# Altium footprint library Capacitors.PcbLib: 59 footprints (part 4 of 4)
Each footprint in its own frame and in the unit in brackets; x right, y up, seen from the top. Pads: shape width x height; smd on the part's side, far side on the other; paste and mask are expansions set on the pad; w line width, h text height; cw(c..) or ccw(c..) is an arc to the next point about the centre after c.
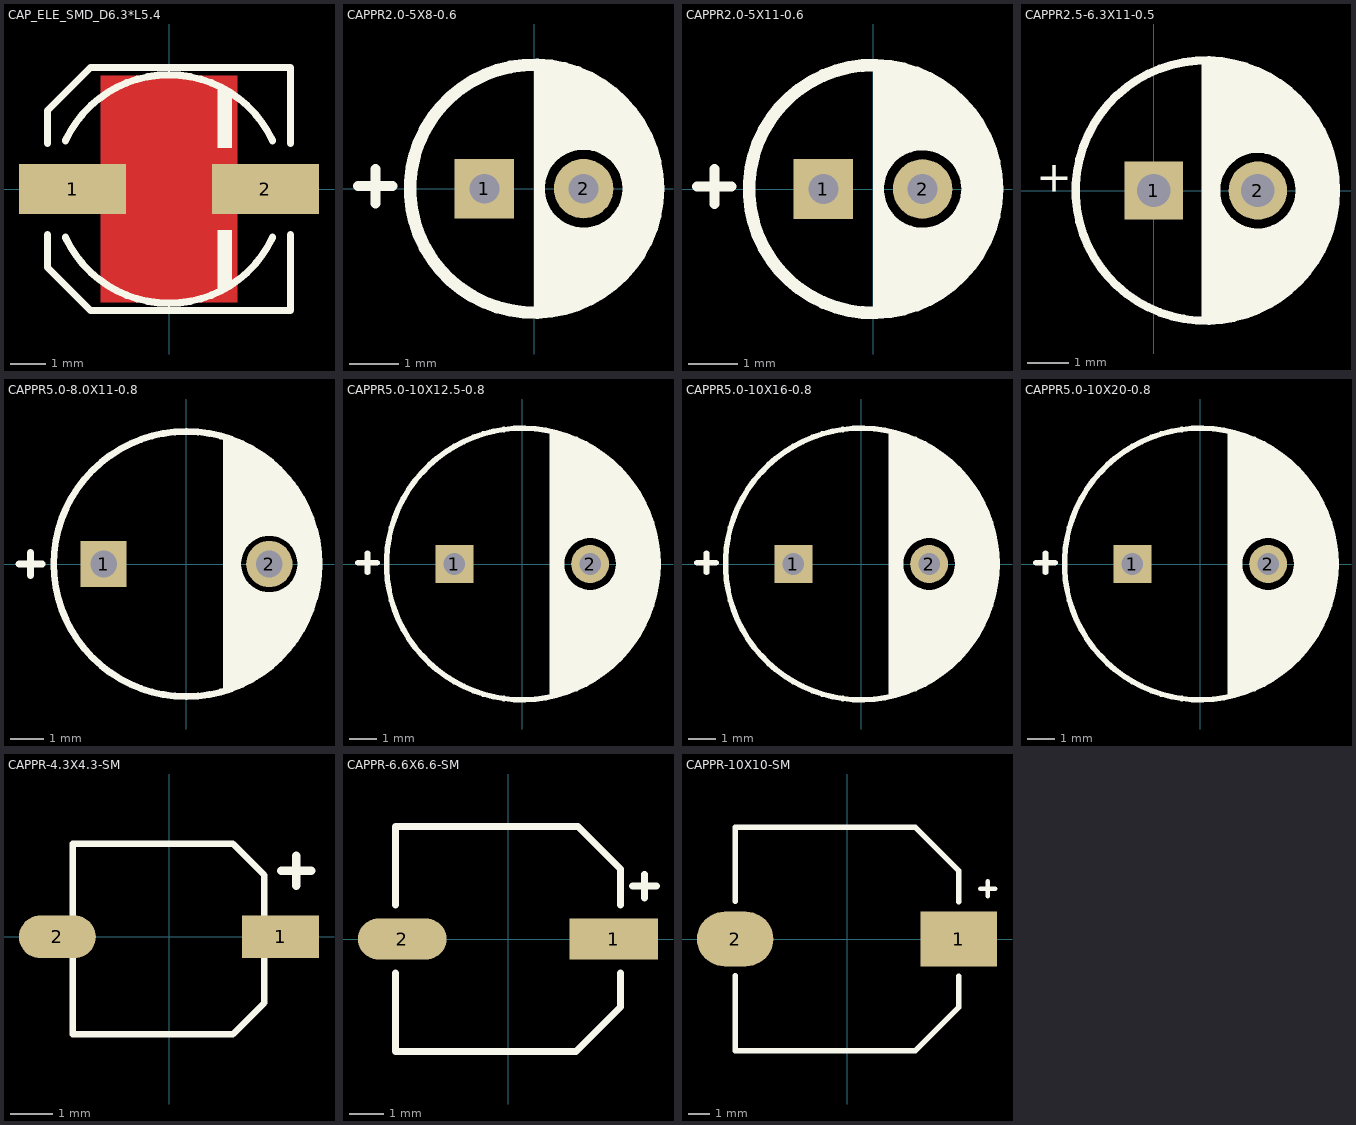
[diagram p3: the footprints below, top view; thin cyan lines are the x and y axes]

## CAP_ELE_SMD_D6.3*L5.4 [mm] "Electrolytic Cap, D: 6.3mm L: 5.4mm, Size D"
height 4
pads (2):
  rect 3x1.4 smd paste-0.154: 1(-2.7,0) 2(2.7,0)
Top Layer:
  pour cut-out: 1.905,3.175 1.905,-3.175 -1.905,-3.175 -1.905,3.175
Top Overlay:
  rectangle: 1.36,1.143 1.76,2.8
  rectangle: 1.36,-2.8 1.76,-1.143
  lines w0.2: -3.4,-1.27 -3.4,-2.2 -2.2,-3.4 3.4,-3.4 3.4,-1.27 ; -3.4,1.27 -3.4,2.2 -2.2,3.4 3.4,3.4 3.4,1.27 ; -2.9,-1.352 ccw(c0,0) 2.9,-1.352 ; -2.9,1.352 cw(c0,0) 2.9,1.352
3D body "User Library-ALU-D.STEP": height 5.4, standoff 0, extent -3.5,-3.3 3.5,3.3

## CAPPR2.0-5X8-0.6 [mm]
pads (2):
  rect 1.2x1.2 hole 0.6: 1(-1,0)
  round 1.2 hole 0.6: 2(1,0)
Top Overlay:
  circle w0.254: c0,0 r2.5
  circle w0.203: c1,0 r0.885
  region: 0,0 0.127,0 0.131,-0.087 0.165,-0.258 0.232,-0.419 0.329,-0.564 0.452,-0.687 0.597,-0.784 0.758,-0.851 0.929,-0.885 1.016,-0.889 1.101,-0.885 1.268,-0.852 1.426,-0.786 1.568,-0.692 1.688,-0.571 1.783,-0.429 1.848,-0.272 1.881,-0.105 1.885,-0.02 1.885,0 2.5,0 2.5,-0.015 2.5,-0.261 2.404,-0.744 2.215,-1.199 1.942,-1.608 1.594,-1.956 1.184,-2.23 0.729,-2.419 0.246,-2.515 0,-2.515
  region: 0,0 0.127,0 0.127,0.025 0.131,0.108 0.163,0.269 0.226,0.421 0.317,0.557 0.433,0.673 0.57,0.765 0.722,0.828 0.883,0.86 0.965,0.864 1.022,0.864 1.106,0.859 1.273,0.826 1.429,0.762 1.57,0.668 1.689,0.548 1.783,0.407 1.848,0.251 1.881,0.085 1.885,0 1.885,-0.015 2.5,-0.015 2.5,-0.011 2.5,0.235 2.404,0.718 2.215,1.173 1.942,1.583 1.594,1.931 1.184,2.205 0.729,2.393 0.246,2.489 0,2.489
  lines w0.203: -3.55,0.05 -3.2,0.05 ; -3.2,-0.3 -3.2,0.05 ; -3.2,0.4 -3.2,0.05 ; -2.85,0.05 -3.2,0.05
3D body "3.0.STEP": height 8, standoff -1.28, extent -2.5,-2.5 2.5,2.499

## CAPPR2.0-5X11-0.6 [mm]
pads (2):
  rect 1.2x1.2 hole 0.6: 1(-1,0)
  round 1.2 hole 0.6: 2(1,0)
Top Overlay:
  circle w0.254: c0,0 r2.5
  circle w0.203: c1,0 r0.881
  region: 0,-2.515 0,0 0.127,0 0.131,-0.087 0.165,-0.258 0.232,-0.419 0.329,-0.564 0.452,-0.687 0.597,-0.784 0.758,-0.851 0.929,-0.885 1.016,-0.889 1.101,-0.885 1.267,-0.852 1.424,-0.787 1.565,-0.693 1.685,-0.573 1.779,-0.432 1.844,-0.275 1.877,-0.109 1.881,-0.024 1.881,0 2.5,0 2.5,-0.015 2.5,-0.261 2.404,-0.744 2.215,-1.199 1.942,-1.608 1.594,-1.956 1.184,-2.23 0.729,-2.419 0.246,-2.515
  region: 0,0 0.127,0 0.127,0.051 0.131,0.133 0.163,0.294 0.226,0.446 0.317,0.583 0.433,0.699 0.57,0.79 0.722,0.853 0.883,0.885 0.965,0.889 0.992,0.889 1.079,0.885 1.25,0.851 1.411,0.784 1.556,0.687 1.679,0.564 1.776,0.419 1.843,0.258 1.877,0.087 1.881,0 1.881,-0.007 2.5,-0.007 2.5,0.015 2.5,0.261 2.404,0.744 2.215,1.199 1.942,1.608 1.594,1.956 1.184,2.23 0.729,2.419 0.246,2.515 0,2.515
  lines w0.203: -3.55,0.05 -3.2,0.05 ; -3.2,-0.3 -3.2,0.05 ; -3.2,0.4 -3.2,0.05 ; -2.85,0.05 -3.2,0.05
3D body "User Library-Cap electro 5x11x2mm.step": height 11.33, standoff -3.47, extent -2.525,-2.54 2.525,2.511

## CAPPR2.5-6.3X11-0.5 [mil]
pads (2):
  rect 56x56 hole 32: 1(0,0)
  round 56 hole 32: 2(100,0)
Top Overlay:
  circle w10: c100,0 r41.23
  circle w8: c50,0 r125
  region: 52,128 54,126 54,54 51,51 51,2 55,-2 60,3 60,21 78,39 118,39 142,15 142,-14 115,-41 87,-41 63,-17 63,-11 56,-4 55,-5 51,-5 51,-119 50,-120 55,-125 77,-125 88,-114 88,-118 97,-118 107,-108 114,-108 156,-66 156,-59 165,-50 165,-39 173,-31 173,13 174,14 171,17 171,38 162,47 162,58 147,73 147,75 112,110 100,110 96,114
  lines w8: 50,-120 50,120
  text "+" at -113,-1 h30
3D body "User Library-Cap-EL(6_3x11-2_5).step": height 433.15, standoff -125.98, extent -76.01,-120.98 172.1,126.99

## CAPPR5.0-8.0X11-0.8 [mm]
pads (2):
  rect 1.4x1.4 hole 0.8: 1(-2.5,0)
  round 1.4 hole 0.8: 2(2.5,0)
Top Overlay:
  circle w0.203: c0,0 r4
  circle w0.5: c2.5,0 r1.1
  lines w0.203: -5.05,0 -4.7,0 ; -4.7,-0.35 -4.7,0 ; -4.7,0.35 -4.7,0 ; -4.35,0 -4.7,0 ; 1.2,-3.8 1.2,3.8 ; 1.3,-3.6 1.7,-3.6 ; 1.4,-3.6 1.4,3.7 ; 1.4,-3.4 2.1,-3.4 2.5,-3 2.5,-1.3 ; 1.6,-3.4 1.6,-0.8 ; 1.6,0.8 1.6,3.6 ; 1.7,-3.4 1.7,-0.9 ; 1.8,-3.4 1.8,-1 ; 1.8,1 1.8,3.5 ; 2,-3.3 2,-1.1 ; 2,1.1 2,3.4 ; 2.1,-3.2 2.1,-1.2 ; 2.2,1.2 2.2,3.3 ; 2.3,-3.2 2.3,-1.2 ; 2.4,3.1 2.4,1.2 2.6,1.4 2.6,3 ; 2.597,1.397 2.8,1.397 2.6,1.597 2.6,1.651 ; 2.7,-2.9 2.7,-1.2 ; 2.8,-2.8 2.8,-1.2 ; 2.8,1.2 2.8,2.7 ; 3,-2.6 3,-1.1 ; 3,1 3,2.6 ; 3.2,-2.4 3.2,-1 ; 3.2,0.9 3.2,2.4 ; 3.4,-1.9 3.4,-0.8 ; 3.4,0.7 3.4,2 ; 3.6,-1.7 3.6,1.7 ; 3.7,-1.38 3.7,-0.87 3.835,-0.735 3.6,-0.735 3.9,-0.435 3.9,0.8 ; 3.7,-1.1 3.7,1.2 3.7,1 3.9,0.8 ; 3.9,-0.8 3.9,0.8
  lines w0.254: 2.6,2.8 2.7,2.8 2.3,3.2 2.3,3.1 3.3,2.1 ; 3.4,-2 3.4,-1.6
3D body "RC.3-.0.STEP": height 12.5, standoff -2, extent -4,-4 4,4

## CAPPR5.0-10X12.5-0.8 [mm]
pads (2):
  rect 1.4x1.4 hole 0.8: 1(-2.5,0)
  round 1.4 hole 0.8: 2(2.5,0)
Top Overlay:
  circle w0.5: c2.5,0 r1.2
  circle w0.203: c0,0 r5
  rectangle: 1,-4.8 1.4,4.8
  rectangle: 1.3,-4.7 1.5,4.8
  rectangle: 1.45,1 2.8,4.2
  rectangle: 2.7,1 3.5,3.6
  rectangle: 3.5,-3.2 3.8,3.3
  rectangle: 1.5,-3.5 3.5,-1
  rectangle: 1.5,-4.2 2.8,-3.3
  rectangle: 3.7,-2.6 4.2,2.8
  rectangle: 4.1,-1.8 4.6,2.2
  rectangle: 4.5,-1.1 4.9,1.4
  lines w0.203: -6.05,0.05 -5.7,0.05 ; -5.7,-0.3 -5.7,0.05 ; -5.7,0.4 -5.7,0.05 ; -5.35,0.05 -5.7,0.05
  lines w1: 1.514,-4.238 ccw(c0,0) 1.569,4.217
3D body "User Library-CAP_Electrolytic_10X14_.step": height 14.1, standoff -4.72, extent -5,-5.055 5,4.945

## CAPPR5.0-10X16-0.8 [mm]
pads (2):
  rect 1.4x1.4 hole 0.8: 1(-2.5,0)
  round 1.4 hole 0.8: 2(2.5,0)
Top Overlay:
  circle w0.5: c2.5,0 r1.2
  circle w0.203: c0,0 r5
  rectangle: 1,-4.8 1.4,4.8
  rectangle: 1.3,-4.7 1.5,4.8
  rectangle: 1.45,1 2.8,4.2
  rectangle: 2.7,1 3.5,3.6
  rectangle: 3.5,-3.2 3.8,3.3
  rectangle: 1.5,-3.5 3.5,-1
  rectangle: 1.5,-4.2 2.8,-3.3
  rectangle: 3.7,-2.6 4.2,2.8
  rectangle: 4.1,-1.8 4.6,2.2
  rectangle: 4.5,-1.1 4.9,1.4
  lines w0.203: -6.05,0.05 -5.7,0.05 ; -5.7,-0.3 -5.7,0.05 ; -5.7,0.4 -5.7,0.05 ; -5.35,0.05 -5.7,0.05
  lines w1: 1.514,-4.238 ccw(c0,0) 1.569,4.217
3D body "RC.3-.1.STEP": height 15.68, standoff -2.45, extent -5.1,-5.1 4.9,4.9

## CAPPR5.0-10X20-0.8 [mm]
pads (2):
  rect 1.4x1.4 hole 0.8: 1(-2.5,0)
  round 1.4 hole 0.8: 2(2.5,0)
Top Overlay:
  circle w0.203: c0,0 r5
  circle w0.5: c2.5,0 r1.2
  rectangle: 4.5,-1.1 4.9,1.4
  rectangle: 4.1,-1.8 4.6,2.2
  rectangle: 3.7,-2.6 4.2,2.8
  rectangle: 1.5,-4.2 2.8,-3.3
  rectangle: 1.5,-3.5 3.5,-1
  rectangle: 3.5,-3.2 3.8,3.3
  rectangle: 2.7,1 3.5,3.6
  rectangle: 1.45,1 2.8,4.2
  rectangle: 1.3,-4.7 1.5,4.8
  rectangle: 1,-4.8 1.4,4.8
  lines w0.203: -6.05,0.05 -5.7,0.05 ; -5.7,-0.3 -5.7,0.05 ; -5.7,0.4 -5.7,0.05 ; -5.35,0.05 -5.7,0.05
  lines w1: 1.514,-4.238 ccw(c0,0) 1.569,4.217
3D body "User Library-CAP_Electrolytic_10X20.step": height 20.1, standoff -4.72, extent -4.996,-5 5.004,5

## CAPPR-4.3X4.3-SM [mm]
pads (2):
  rect 1.8x1 smd: 1(2.616,0)
  oval 1.8x1 smd: 2(-2.616,0)
Top Overlay:
  lines w0.152: -2.261,-2.286 1.499,-2.286 2.235,-1.549 2.235,1.448 1.499,2.184 -2.261,2.184 -2.261,-2.286
  lines w0.203: 2.634,1.55 2.984,1.55 ; 2.984,1.2 2.984,1.55 ; 2.984,1.9 2.984,1.55 ; 3.334,1.55 2.984,1.55
3D body "User Library-cap-elec-430x430h390.step": height 3.9, standoff 0, extent -2.675,-2.201 2.625,2.099

## CAPPR-6.6X6.6-SM [mm]
pads (2):
  rect 2.6x1.2 smd: 1(3.1,0)
  oval 2.6x1.2 smd: 2(-3.1,0)
Top Overlay:
  lines w0.203: -3.3,-1 -3.3,-3.3 2,-3.3 3.3,-2 3.3,-1 ; -3.3,1 -3.3,3.3 2.05,3.3 3.3,2.05 3.3,1 ; 3.65,1.55 4,1.55 ; 4,1.2 4,1.55 ; 4,1.9 4,1.55 ; 4.35,1.55 4,1.55
3D body "CAP 4040.STEP": height 8, standoff 0, extent -3.656,-3.05 3.456,3.1

## CAPPR-10X10-SM [mm]
pads (2):
  rect 3.5x2.5 smd: 1(5.125,0)
  oval 3.5x2.5 smd: 2(-5.125,0)
Top Overlay:
  lines w0.203: 6.1,2.3 6.45,2.3 ; 6.45,1.95 6.45,2.3 ; 6.45,2.65 6.45,2.3 ; 6.8,2.3 6.45,2.3
  lines w0.254: -5.125,-1.675 -5.125,-5.125 3.125,-5.125 5.125,-3.125 5.125,-1.7 ; -5.125,1.725 -5.125,5.125 3.125,5.125 5.125,3.125 5.125,1.7
3D body "CAP 4040.STEP": height 11, standoff 0, extent -5.918,-5.105 5.936,5.145